# Altium footprint library John_W.PcbLib: 35 footprints (part 3 of 3)
Each footprint in its own frame and in the unit in brackets; x right, y up, seen from the top. Pads: shape width x height; smd on the part's side, far side on the other; paste and mask are expansions set on the pad; w line width, h text height; cw(c..) or ccw(c..) is an arc to the next point about the centre after c.
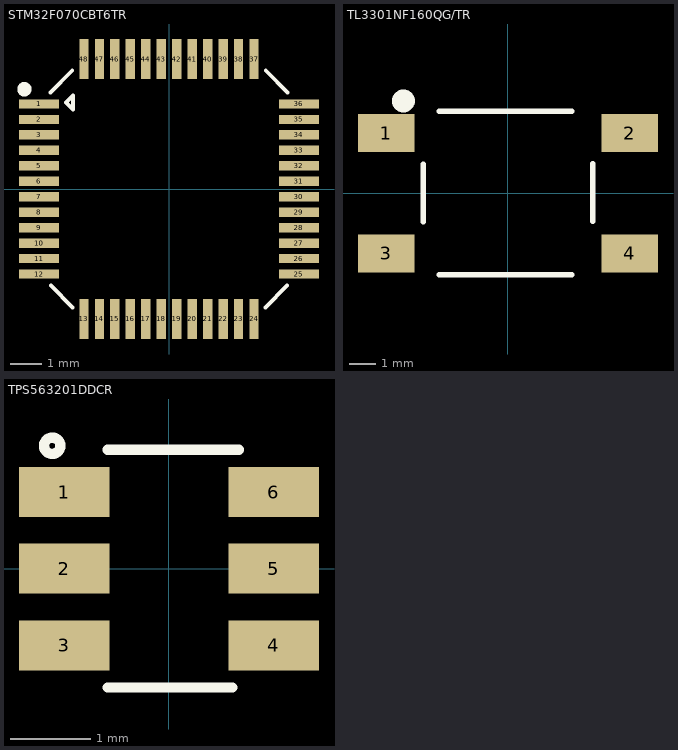
[diagram p2: the footprints below, top view; thin cyan lines are the x and y axes]

## STM32F070CBT6TR [mm]
pads (48):
  rect 1.3x0.3 smd: 1(-4.2,2.75) 2(-4.2,2.25) 3(-4.2,1.75) 4(-4.2,1.25) 5(-4.2,0.75) 6(-4.2,0.25) 7(-4.2,-0.25) 8(-4.2,-0.75) 9(-4.2,-1.25) 10(-4.2,-1.75) 11(-4.2,-2.25) 12(-4.2,-2.75) 25(4.2,-2.75) 26(4.2,-2.25) 27(4.2,-1.75) 28(4.2,-1.25) 29(4.2,-0.75) 30(4.2,-0.25) 31(4.2,0.25) 32(4.2,0.75) 33(4.2,1.25) 34(4.2,1.75) 35(4.2,2.25) 36(4.2,2.75)
  rect 0.3x1.3 smd: 13(-2.75,-4.2) 14(-2.25,-4.2) 15(-1.75,-4.2) 16(-1.25,-4.2) 17(-0.75,-4.2) 18(-0.25,-4.2) 19(0.25,-4.2) 20(0.75,-4.2) 21(1.25,-4.2) 22(1.75,-4.2) 23(2.25,-4.2) 24(2.75,-4.2) 37(2.75,4.2) 38(2.25,4.2) 39(1.75,4.2) 40(1.25,4.2) 41(0.75,4.2) 42(0.25,4.2) 43(-0.25,4.2) 44(-0.75,4.2) 45(-1.25,4.2) 46(-1.75,4.2) 47(-2.25,4.2) 48(-2.75,4.2)
Top Overlay:
  circle w0.254: c-4.674,3.226 r0.105
  lines w0.127: -3.835,3.124 -3.128,3.831 ; -3.822,-3.119 -3.115,-3.826 ; -3.103,2.565 -3.331,2.794 -3.103,3.023 -3.103,2.595 ; 3.115,-3.826 3.822,-3.119 ; 3.128,3.831 3.835,3.124
3D body "User Library-TQFP-48.STEP": height 1.39, standoff -0.07, extent -4.496,-4.504 4.504,4.496

## TL3301NF160QG/TR [mm] "Tactile Switch SPST-NO Top Actuated Surface Mount"
pads (4):
  rect 2.12x1.42 smd: 1(-4.55,2.25) 2(4.55,2.25) 3(-4.55,-2.25) 4(4.55,-2.25)
Top Overlay:
  circle w0.5: c-3.912,3.454 r0.178
  lines w0.2: -3.175,-1.067 -3.175,1.092 ; -2.565,-3.048 2.388,-3.048 ; -2.565,3.073 2.388,3.073 ; 3.175,-1.041 3.175,1.118
3D body "TL3301NFxxxxG.stp": height 4.41, standoff 0.01, extent -5,-3 5,3

## TPS563201DDCR [mm]
pads (6):
  rect 1.12x0.62 smd: 1(-1.3,0.95) 2(-1.3,0) 3(-1.3,-0.95) 4(1.3,-0.95) 5(1.3,0) 6(1.3,0.95)
Top Overlay:
  circle w0.127: c-1.448,1.524 r0.102
  lines w0.127: -0.762,-1.473 0.787,-1.473 ; -0.762,1.473 0.864,1.473
3D body "User Library-SOT23-6-2.step": height 1.44, standoff -0.01, extent -1.4,-1.45 1.4,1.45